# Altium schematic symbol library Schlib_BDD.SchLib: 10 symbols
Pins are listed as number, name and electrical type; pins without a type are passive.

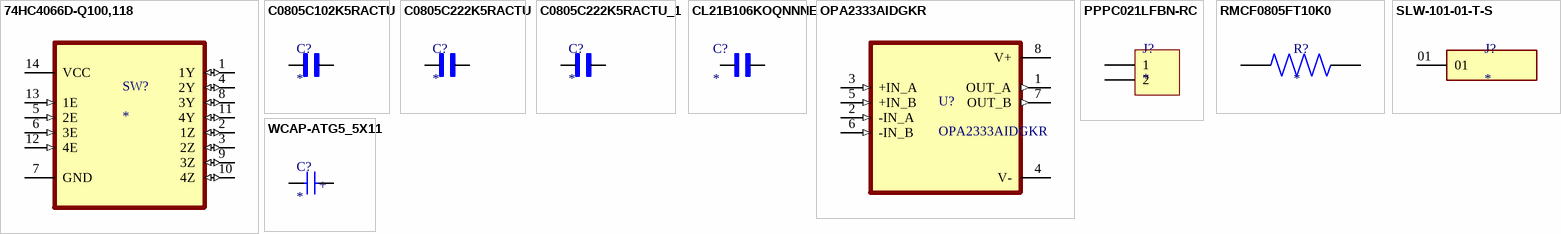
[diagram p0: symbols 74HC4066D-Q100,118 to WCAP-ATG5_5X11]

## 74HC4066D-Q100,118
designator SW?
4 Circuit IC Switch 1:1 95Ohm 14-SO; MF: Nexperia USA; MP: 74HC4066D-Q100,118; SnapEDA_Link: https://www.snapeda.com/parts/74HC4066D-Q100,118/Nexperia/view-part/?ref=snap; Package: SO14-14 Nexperia USA Inc.; Value: *; Check_prices: https://www.snapeda.com/parts/74HC4066D-Q100,118/Nexperia/view-part/?ref=eda
footprint SOIC127P600X175-14N
footprint SOIC127P600X175-14N
pins: 1 1Y (io), 2 1Z (io), 3 2Z (io), 4 2Y (io), 5 2E (in), 6 3E (in), 7 GND, 8 3Y (io), 9 3Z (io), 10 4Z (io), 11 4Y (io), 12 4E (in), 13 1E (in), 14 VCC (power)

## C0805C102K5RACTU
designator C?
Multilayer Ceramic Capacitors MLCC - SMD/SMT 50V 1000pF X7R 0805 10%; MF: KEMET; MP: C0805C102K5RAC TU; SnapEDA_Link: https://www.snapeda.com/parts/C0805C102K5RAC%20TU/Kemet/view-part/?ref=snap; Package: 805-2 KEMET; Value: *; Check_prices: https://www.snapeda.com/parts/C0805C102K5RAC%20TU/Kemet/view-part/?ref=eda
footprint CAPC2012X140N
footprint CAPC2012X140N
pins: 1, 2

## C0805C222K5RACTU
designator C?
Capacitor, Ceramic, Cap, 2200pF, Tol 10%, SMT, 50V, X7R | KEMET C0805C222K5RACTU; SnapEDA_Link: https://www.snapeda.com/parts/C0805C222K5RACTU/KEMET/view-part/?ref=snap; Package: 805-2 KEMET; Value: *; MF: KEMET; MP: C0805C222K5RACTU; Check_prices: https://www.snapeda.com/parts/C0805C222K5RACTU/KEMET/view-part/?ref=eda
footprint CAPC2012X88N
footprint CAPC2012X88N
pins: 1, 2

## C0805C222K5RACTU_1
designator C?
Capacitor, Ceramic, Cap, 2200pF, Tol 10%, SMT, 50V, X7R | KEMET C0805C222K5RACTU; SnapEDA_Link: https://www.snapeda.com/parts/C0805C222K5RACTU/KEMET/view-part/?ref=snap; Package: 805-2 KEMET; Value: *; MF: KEMET; MP: C0805C222K5RACTU; Check_prices: https://www.snapeda.com/parts/C0805C222K5RACTU/KEMET/view-part/?ref=eda
footprint CAPC2012X88N
footprint CAPC2012X88N
pins: 1, 2

## CL21B106KOQNNNE
designator C?
16V 10uF X7R 卤10% 0805 Multilayer Ceramic Capacitors MLCC - SMD/SMT ROHS; Manufacturer: Samsung Electro-Mechanics; Manufacturer Part Number: CL21B106KOQNNNE; Value: 10µF; Tolerance: 10%; Supplier: DigiKey; Supplier Part Number: 1276-2872-6-ND; RoHS: Compliant; Category: Ceramic Capacitors; Stock: 5268; Pricing: 1=0.28, 10=0.165, 50=0.1194, 100=0.1053, 500=0.08152 (USD); Case/Package: 0805; Case Code (Imperial): 0805; Case Code (Metric): 2012; China RoHS: Compliant; Contact Plating: Tin; Country of Origin: Mainland China, Philippines, South Korea; Depth: 1.25mm; Dielectric: X7R; Dielectric Material: Ceramic; Export Control Classification Number (ECCN) Code: EAR99; Height: 1.4mm; Harmonized Tariff Schedule (HTS) Code: 8532.24.00.20; Introduction Date: 2010-04-09; Length: 2mm; Lifecycle Status: Production; Material: Ceramic; Max Operating Temperature: 125°C; Min Operating Temperature: -55°C; Mounting Technology: Surface Mount; Number of Terminals: 2; Radiation Hardening: No; REACH SVHC: Unaffected; Schedule B: 8532240020, 8532240020|8532240020, 8532240020|8532240020|8532240020, 8532240020|8532240020|8532240020|8532240020; Thickness: 1.397mm; Voltage: 16V; Voltage Rating: 16V; Voltage Rating (DC): 16V; Width: 1.25mm; ComponentLink1URL: https://datasheet.octopart.com:443/CL21B106KOQNNNE-Samsung-Electro-Mechanics-datasheet-136482503.pdf?src-supplier=IHS; ComponentLink1Description: https://datasheet.octopart.com:443/CL21B106KOQNNNE-Samsung-Electro-Mechanics-datasheet-136482503.pdf?src-supplier=IHS; ComponentLink2URL: https://datasheet.octopart.com:443/CL21B106KOQNNNE-Samsung-Electro-Mechanics-datasheet-116891046.pdf?src-supplier=Future+Electronics; ComponentLink2Description: https://datasheet.octopart.com:443/CL21B106KOQNNNE-Samsung-Electro-Mechanics-datasheet-116891046.pdf?src-supplier=Future+Electronics; ComponentLink3URL: https://datasheet.octopart.com:443/CL21B106KOQNNNE-Samsung-Electro-Mechanics-datasheet-81462191.pdf?src-supplier=Future+Electronics; ComponentLink3Description: https://datasheet.octopart.com:443/CL21B106KOQNNNE-Samsung-Electro-Mechanics-datasheet-81462191.pdf?src-supplier=Future+Electronics; ComponentLink4URL: https://datasheet.octopart.com:443/CL21B106KOQNNNE-Samsung-datasheet-12530662.pdf?src-supplier=Future+Electronics; ComponentLink4Description: https://datasheet.octopart.com:443/CL21B106KOQNNNE-Samsung-datasheet-12530662.pdf?src-supplier=Future+Electronics; ComponentLink5URL: https://datasheet.octopart.com:443/CL21B106KOQNNNE-Samsung-datasheet-26669285.pdf?src-supplier=Future+Electronics; ComponentLink5Description: https://datasheet.octopart.com:443/CL21B106KOQNNNE-Samsung-datasheet-26669285.pdf?src-supplier=Future+Electronics; ComponentLink6URL: https://datasheet.octopart.com:443/CL21B106KOQNNNE-Samsung-Electro-Mechanics-datasheet-149045986.pdf?src-supplier=Future+Electronics; ComponentLink6Description: https://datasheet.octopart.com:443/CL21B106KOQNNNE-Samsung-Electro-Mechanics-datasheet-149045986.pdf?src-supplier=Future+Electronics; ComponentLink7URL: https://datasheet.octopart.com/CL21B106KOQNNNE-Samsung-Electro-Mechanics-datasheet-97040617.pdf; ComponentLink7Description: https://datasheet.octopart.com/CL21B106KOQNNNE-Samsung-Electro-Mechanics-datasheet-97040617.pdf; ComponentLink8URL: https://datasheet.octopart.com/CL21B106KOQNNNE-Samsung-Electro-Mechanics-datasheet-8324245.pdf; ComponentLink8Description: https://datasheet.octopart.com/CL21B106KOQNNNE-Samsung-Electro-Mechanics-datasheet-8324245.pdf; ComponentLink9URL: https://datasheet.octopart.com:443/CL21B106KOQNNNE-Samsung-Electro-Mechanics-datasheet-11806859.pdf?src-supplier=Arrow+Electronics; ComponentLink9Description: https://datasheet.octopart.com:443/CL21B106KOQNNNE-Samsung-Electro-Mechanics-datasheet-11806859.pdf?src-supplier=Arrow+Electronics; ComponentLink10URL: https://datasheet.octopart.com:443/CL21B106KOQNNNE-Samsung-datasheet-8326407.pdf?src-supplier=TME; ComponentLink10Description: https://datasheet.octopart.com:443/CL21B106KOQNNNE-Samsung-datasheet-8326407.pdf?src-supplier=TME
footprint CAPC2012X140N
pins: 1, 2

## OPA2333AIDGKR
designator U?
Op Amp Dual Low Offset Voltage Amplifier R-R I/O ±2.75V/5.5V 8-Pin VSSOP T/R; Manufacturer: Texas Instruments; Manufacturer Lifecycle Status: ACTIVE; Bandwidth: 350kHz; Common Mode Rejection Ratio: 106dB; Input Bias Current: 200pA; Input Offset Voltage (Vos): 10µV; Max Dual Supply Voltage: 2.75V; Max Supply Voltage: 5.5V; Min Dual Supply Voltage: 900mV; Min Supply Voltage: 1.8V; Nominal Supply Current: 50µA; Number of Amplifiers: 2; Operating Supply Current: 17µA; Output Current: 5mA; Power Supply Rejection Ratio (PSRR): 120dB; Slew Rate: 0.16V/µs; Voltage Gain: 130dB; Supplier: DigiKey; Supplier Part Number: 296-22883-1-ND; Manufacturer Part Number: OPA2333AIDGKR; RoHS: Compliant; Category: Amplifiers - Op Amps, Buffer, Instrumentation; Stock: 10638; Pricing: 1=3.57, 10=2.685, 25=2.4644, 100=2.221, 250=2.105, 500=2.08222 (USD); Case/Package: VSSOP; Contact Plating: Gold; Gain Bandwidth Product: 350kHz; Height: 0m; Lead Free: Lead Free; Length: 3mm; Lifecycle Status: Production; Max Operating Temperature: 125°C; Min Operating Temperature: -40°C; Mounting Technology: Surface Mount; Number of Channels: 2; Number of Circuits: 2; Number of Elements: 2; Pins: 8; Operating Supply Voltage: 2.75V; Output Current per Channel: 5mA; Radiation Hardening: No; REACH SVHC: Unaffected; Schedule B: 8542330000, 8542330000|8542330000|8542330000|8542330000|8542330000|8542330000|8542330000|8542330000|8542330000|8542330000|8542330000|8542330000|8542330000|8542330000|8542330000|8542330000|8542330000|8542330000|8542330000|8542330000|8542330000|8542330000|8542330000|85; Thickness: 970µm; Width: 3mm; ComponentLink1URL: https://sigma.octopart.com:443/178522223/technical_drawing/Texas-Instruments-OPA2333AIDGKR.pdf?src-supplier=Texas+Instruments; ComponentLink1Description: https://sigma.octopart.com:443/178522223/technical_drawing/Texas-Instruments-OPA2333AIDGKR.pdf?src-supplier=Texas+Instruments; ComponentLink2URL: https://octopart.com:443/opatz8j6/c1?t=SMwSThvPQdfEatth7KxTlaChlfAn7cTT6cjUaDOw74_NNjJekNKZsyDhtEuoS4eKOtTCAFoXNB_E0_suCzQRzP-DIx0-X5xPpe16GRNB2_TwyK3MTEefCYRPZXaRX4Ah5Et8Hp2tgH5a_c-EBlnpLi2u6G3ZeI9Yp4iXIdwQUDRBtk84yqC_eI37WOWlO_ryHnFZGceJsefqTsJ9uvmeBKHVoTMmyAxA9rG3m3YstuwKigXOvcpgbcNt11nNHF3DAIlkU7pXQ2myhrrwPrPO63mDfxIToaVVd93B2pkmMI_lgIrjcud5OpkULzyK-ZMWFB4P2qgS7zv3tgV9E1cMDir58flv6M2fK5waIwwdQmCxsepTno10BpDtRzBXMqLoPGYrqQ&src-supplier=Texas+Instruments; ComponentLink2Description: https://octopart.com:443/opatz8j6/c1?t=SMwSThvPQdfEatth7KxTlaChlfAn7cTT6cjUaDOw74_NNjJekNKZsyDhtEuoS4eKOtTCAFoXNB_E0_suCzQRzP-DIx0-X5xPpe16GRNB2_TwyK3MTEefCYRPZXaRX4Ah5Et8Hp2tgH5a_c-EBlnpLi2u6G3ZeI9Yp4iXIdwQUDRBtk84yqC_eI37WOWlO_ryHnFZGceJsefqTsJ9uvmeBKHVoTMmyAxA9rG3m3YstuwKigXOvcpgbcNt11nNHF3DAIlkU7pXQ2myhrrwPrPO63mDfxIToaVVd93B2pkmMI_lgIrjcud5OpkULzyK-ZMWFB4P2qgS7zv3tgV9E1cMDir58flv6M2fK5waIwwdQmCxsepTno10BpDtRzBXMqLoPGYrqQ&src-supplier=Texas+Instruments; ComponentLink3URL: https://datasheet.octopart.com:443/OPA2333AIDGKR-Texas-Instruments-datasheet-37724099.pdf?src-supplier=Texas+Instruments; ComponentLink3Description: https://datasheet.octopart.com:443/OPA2333AIDGKR-Texas-Instruments-datasheet-37724099.pdf?src-supplier=Texas+Instruments; ComponentLink4URL: https://datasheet.octopart.com:443/OPA2333AIDGKR-Texas-Instruments-datasheet-21095362.pdf?src-supplier=Texas+Instruments; ComponentLink4Description: https://datasheet.octopart.com:443/OPA2333AIDGKR-Texas-Instruments-datasheet-21095362.pdf?src-supplier=Texas+Instruments; ComponentLink5URL: https://datasheet.octopart.com:443/OPA2333AIDGKR-Texas-Instruments-datasheet-152276.pdf?src-supplier=Texas+Instruments; ComponentLink5Description: https://datasheet.octopart.com:443/OPA2333AIDGKR-Texas-Instruments-datasheet-152276.pdf?src-supplier=Texas+Instruments; ComponentLink6URL: https://sigma.octopart.com:443/49250154/technical_drawing/Texas-Instruments-OPA2333AIDGKR.pdf?src-supplier=Texas+Instruments; ComponentLink6Description: https://sigma.octopart.com:443/49250154/technical_drawing/Texas-Instruments-OPA2333AIDGKR.pdf?src-supplier=Texas+Instruments; ComponentLink7URL: https://datasheet.octopart.com:443/OPA2333AIDGKR-Texas-Instruments-datasheet-82492514.pdf?src-supplier=Newark; ComponentLink7Description: https://datasheet.octopart.com:443/OPA2333AIDGKR-Texas-Instruments-datasheet-82492514.pdf?src-supplier=Newark; ComponentLink8URL: https://datasheet.octopart.com:443/OPA2333AIDGKR-Texas-Instruments-datasheet-17021844.pdf?src-supplier=Newark; ComponentLink8Description: https://datasheet.octopart.com:443/OPA2333AIDGKR-Texas-Instruments-datasheet-17021844.pdf?src-supplier=Newark; ComponentLink9URL: https://datasheet.octopart.com:443/OPA2333AIDGKR-Texas-Instruments-datasheet-23768453.pdf?src-supplier=Newark; ComponentLink9Description: https://datasheet.octopart.com:443/OPA2333AIDGKR-Texas-Instruments-datasheet-23768453.pdf?src-supplier=Newark; ComponentLink10URL: https://datasheet.octopart.com:443/OPA2333AIDGKR-Texas-Instruments-datasheet-165804235.pdf?src-supplier=LCSC; ComponentLink10Description: https://datasheet.octopart.com:443/OPA2333AIDGKR-Texas-Instruments-datasheet-165804235.pdf?src-supplier=LCSC; ComponentLink11URL: https://datasheet.octopart.com:443/OPA2333AIDGKR-Texas-Instruments-datasheet-159115573.pdf?src-supplier=LCSC; ComponentLink11Description: https://datasheet.octopart.com:443/OPA2333AIDGKR-Texas-Instruments-datasheet-159115573.pdf?src-supplier=LCSC; ComponentLink12URL: https://datasheet.octopart.com:443/OPA2333AIDGKR-Texas-Instruments-datasheet-164415937.pdf?src-supplier=SHENGYU+ELECTRONICS; ComponentLink12Description: https://datasheet.octopart.com:443/OPA2333AIDGKR-Texas-Instruments-datasheet-164415937.pdf?src-supplier=SHENGYU+ELECTRONICS; ComponentLink13URL: https://datasheet.octopart.com:443/OPA2333AIDGKR-Texas-Instruments-datasheet-165082070.pdf?src-supplier=Burklin+Elektronik; ComponentLink13Description: https://datasheet.octopart.com:443/OPA2333AIDGKR-Texas-Instruments-datasheet-165082070.pdf?src-supplier=Burklin+Elektronik; ComponentLink14URL: https://datasheet.octopart.com:443/OPA2333AIDGKR-Texas-Instruments-datasheet-14137206.pdf?src-supplier=iiiC; ComponentLink14Description: https://datasheet.octopart.com:443/OPA2333AIDGKR-Texas-Instruments-datasheet-14137206.pdf?src-supplier=iiiC; ComponentLink15URL: http://sigma.octopart.com:80/reach_statement/Texas-Instruments-company-64.pdf?src-supplier=Compliance+Statements; ComponentLink15Description: http://sigma.octopart.com:80/reach_statement/Texas-Instruments-company-64.pdf?src-supplier=Compliance+Statements; ComponentLink16URL: http://sigma.octopart.com:80/conflict_mineral_statement/Texas-Instruments-company-63.pdf?src-supplier=Compliance+Statements; ComponentLink16Description: http://sigma.octopart.com:80/conflict_mineral_statement/Texas-Instruments-company-63.pdf?src-supplier=Compliance+Statements
footprint SOP65P490X110-8N
footprint SOP65P490X110-8N
pins: 1 OUT_A (out), 2 -IN_A (in), 3 +IN_A (in), 4 V- (power), 5 +IN_B (in), 6 -IN_B (in), 7 OUT_B (out), 8 V+ (power)

## PPPC021LFBN-RC
designator J?
Female, 2 C, Straight .100" CC; 3.20mm Tail, No Mounting; PBT, Phos. Bronze, 105 C; Manufacturer: Sullins; Manufacturer Part Number: PPPC021LFBN-RC; Connector Type: Header, Socket; Current Rating: 3A; Dielectric Material: Polyester; Number of Contacts: 2; Pitch: 2.54mm; Voltage Rating: 250V; Supplier: DigiKey; Supplier Part Number: S7035-ND; RoHS: Compliant; Category: Card Edge Connectors; Stock: 38153; Pricing: 1=0.28, 10=0.234, 100=0.1984, 500=0.17706, 1000=0.16859, 5000=0.15048, 10000=0.1433 (USD); Color: Black; Contact Material: Gold, Nickel; Contact Plating: Gold; Export Control Classification Number (ECCN) Code: EAR99; Gender: Female; Height: 8.7mm; Housing Material: Plastic; Harmonized Tariff Schedule (HTS) Code: 8536.69.40.40; Introduction Date: 2008-05-14; Lead Free: Lead Free; Length: 5.58mm; Lifecycle Status: Production; Max Operating Temperature: 105°C; Min Operating Temperature: -40°C; Mounting Technology: Through Hole; Number of Positions: 2; Number of Rows: 1; Orientation: Straight; Packaging: Bulk; REACH SVHC: Unaffected; Terminal Pitch: 2.54mm; Termination: Solder; Width: 2.5mm; ComponentLink1URL: https://datasheet.octopart.com:443/PPPC021LFBN-RC-Sullins-datasheet-138810743.pdf?src-supplier=IHS; ComponentLink1Description: https://datasheet.octopart.com:443/PPPC021LFBN-RC-Sullins-datasheet-138810743.pdf?src-supplier=IHS; ComponentLink2URL: https://datasheet.octopart.com:443/PPPC021LFBN-RC-Sullins-datasheet-83216130.pdf?src-supplier=Upverter; ComponentLink2Description: https://datasheet.octopart.com:443/PPPC021LFBN-RC-Sullins-datasheet-83216130.pdf?src-supplier=Upverter; ComponentLink3URL: https://datasheet.octopart.com:443/PPPC021LFBN-RC-Sullins-datasheet-41308905.pdf?src-supplier=Future+Electronics; ComponentLink3Description: https://datasheet.octopart.com:443/PPPC021LFBN-RC-Sullins-datasheet-41308905.pdf?src-supplier=Future+Electronics; ComponentLink4URL: https://datasheet.octopart.com:443/PPPC021LFBN-RC-Sullins-datasheet-12511165.pdf?src-supplier=Future+Electronics; ComponentLink4Description: https://datasheet.octopart.com:443/PPPC021LFBN-RC-Sullins-datasheet-12511165.pdf?src-supplier=Future+Electronics
footprint My_1X02
pins: 1, 2

## RMCF0805FT10K0
designator R?
MF: {'manufacturer': u'Stackpole Electronics Inc'}; MP: RMCF0805FT10K0; Package: None; Price: None; Value: *; Availability: Unavailable
footprint RESC2012X65N
footprint RESC2012X65N
pins: 1, 2

## SLW-101-01-T-S
designator J?
MP: SLW-101-01-T-S; Value: *; Package: None; Availability: Unavailable; Price: None
footprint SAMTEC_SLW-101-01-T-S
footprint SAMTEC_SLW-101-01-T-S
pins: 01

## WCAP-ATG5_5X11
designator C?
ATDC110010M050DSPA3B000; THT Radial; 1 ÂµF Â± 20%; 50 V(DC); 2000 h; -40Â°C / +105Â°C; size DxL 5.0 x 11.0; pitch 2.0; Pin Ã˜ 0.5; Max. Iripple 13 mA @120 Hz; LC 3 ÂµA; DF 10%; MF: Wurth Electronics; MP: 860020672005; SnapEDA_Link: https://www.snapeda.com/parts/860020672005/Wurth+Electronics/view-part/?ref=snap; Package: Radial Wurth Electronics; Value: *; Check_prices: https://www.snapeda.com/parts/860020672005/Wurth+Electronics/view-part/?ref=eda
footprint WCAP-ATG5_5X11(DXL)
footprint WCAP-ATG5_5X11(DXL)
pins: 1 POS, 2 NEG
text: +